# EAGLE library part 54602-908LF (library 54602-908LF)
Modular Jack, Input Output Connectors, Cat 3 Single Modular Jack, Horizontal, Board Through Mount, 8P8C, 1 Port Source: Datasheet <https://cdn.amphenol-cs.com/media/wysiwyg/files/drawing/c-bmj-0102.pdf>
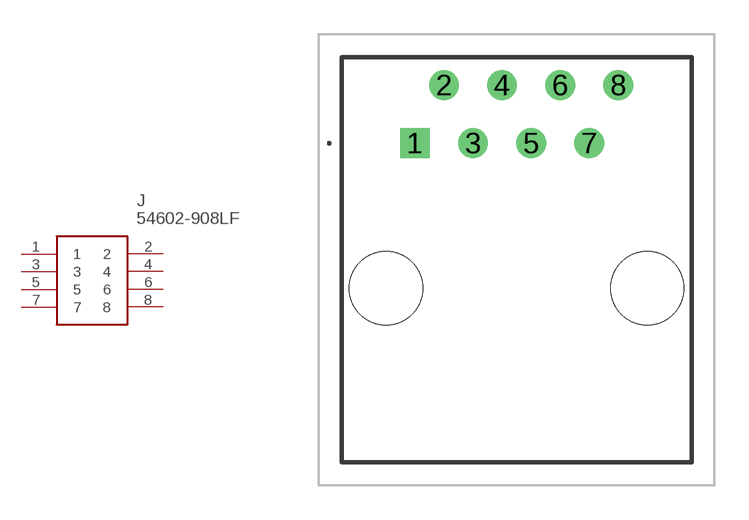
[diagram p0: symbol with the pads of 54602908LF; footprint 54602908LF]

Designator prefix J

## 54602-908LF (Arrow_Part_Number: 54602-908LF; Arrow_Price-Stock: https://www.arrow.com/en/products/54602-908lf/amphenol-fci.html?utm_currency=USD&region=asia; Description: Modular Jack, Input Output Connectors, Cat 3 Single Modular Jack, Horizontal, Board Through Mount, 8P8C, 1 Port; Height: 12.85mm; Manufacturer_Name: Amphenol Communications Solutions; Manufacturer_Part_Number: 54602-908LF)  [54602908LF]
1  1
2  2
3  3
4  4
5  5
6  6
7  7
8  8

## Footprint 54602908LF (pad centres in mm)
54602-908LF-2
drill 0.76 pad 1.303 square: 1 0,0
drill 0.76 pad 1.303: 2 1.27,2.54; 3 2.54,0; 4 3.81,2.54; 5 5.08,0; 6 6.35,2.54; 7 7.62,0; 8 8.89,2.54
hole 3.2 at -1.27,-6.35
hole 3.2 at 10.16,-6.35